# Altium schematic symbol library 2020-12-10_20-22-55.SchLib: 2 symbols
Pins are listed as number, name and electrical type; pins without a type are passive.

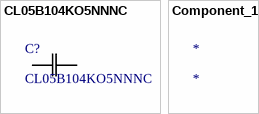
[diagram p0: symbols CL05B104KO5NNNC to Component_1]

## CL05B104KO5NNNC
designator C?
No Description Available; Vendor: Samsung; Built_By: EMA_Rocco; SourceLibrary: Samsung_2019-08-29; Type: DEV; Manufacturer_Part_Number: CL05B104KO5NNNC; Copyright: Copyright (C) 2018 Accelerated Designs. All rights reserved; RefDes: RefDes
footprint CAP_CL05_SAM
pins: 1, 2

## Component_1
designator *